# Altium schematic symbol library 1-1734248-5.SchLib: 1 symbol
Pins are listed as number, name and electrical type; pins without a type are passive.

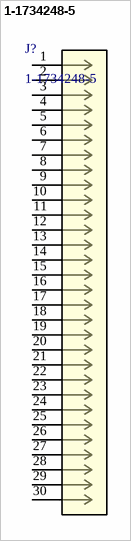
[diagram p0: symbol 1-1734248-5]

## 1-1734248-5
designator J?
1.0 FPC, ZIF V/T, SMT, 15P; Manufacturer_Name: TE Connectivity; TYPE: Receptacle; Copyright: Copyright (C) 2026 Ultra Librarian. All rights reserved.; Manufacturer_Part_Number: 1-1734248-5; RefDes: RefDes
footprint conn30_1-1734248-5_TEC
pins: 1, 2, 3, 4, 5, 6, 7, 8, 9, 10, 11, 12, 13, 14, 15, 16, 17, 18, 19, 20, 21, 22, 23, 24, 25, 26, 27, 28, 29, 30